# Altium schematic symbol library FPGA_VREG.SchLib: 16 symbols
Pins are listed as number, name and electrical type; pins without a type are passive.

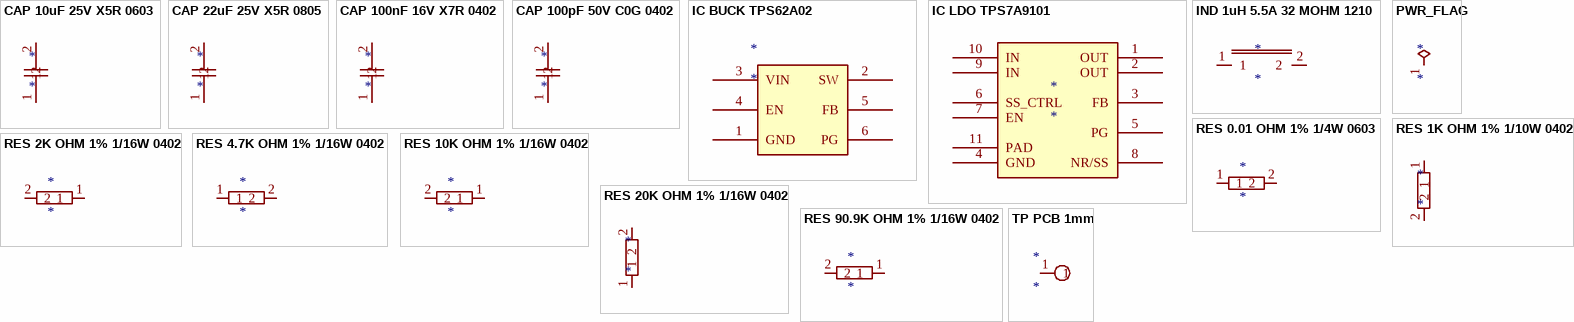
[diagram p0: symbols CAP 10uF 25V X5R 0603 to TP PCB 1mm]

## CAP 10uF 25V X5R 0603
designator *
pins: 1, 2

## CAP 22uF 25V X5R 0805
designator *
pins: 1, 2

## CAP 100nF 16V X7R 0402
designator *
pins: 1, 2

## CAP 100pF 50V C0G 0402
designator *
pins: 1, 2

## IC BUCK TPS62A02
designator *
pins: 1 GND, 2 SW, 3 VIN, 4 EN, 5 FB, 6 PG

## IC LDO TPS7A9101
designator *
pins: 1 OUT, 2 OUT, 3 FB, 4 GND, 5 PG, 6 SS_CTRL, 7 EN, 8 NR/SS, 9 IN, 10 IN, 11 PAD

## IND 1uH 5.5A 32 MOHM 1210
designator *
pins: 1, 2

## PWR_FLAG
designator *  (graphical)
pins: 1

## RES 0.01 OHM 1% 1/4W 0603
designator *
pins: 1, 2

## RES 1K OHM 1% 1/10W 0402
designator *
pins: 1, 2

## RES 2K OHM 1% 1/16W 0402
designator *
pins: 1, 2

## RES 4.7K OHM 1% 1/16W 0402
designator *
pins: 1, 2

## RES 10K OHM 1% 1/16W 0402
designator *
pins: 1, 2

## RES 20K OHM 1% 1/16W 0402
designator *
pins: 1, 2

## RES 90.9K OHM 1% 1/16W 0402
designator *
pins: 1, 2

## TP PCB 1mm
designator *
pins: 1